# Altium footprint library 排母.PcbLib: 66 footprints (part 2 of 5)
Each footprint in its own frame and in the unit in brackets; x right, y up, seen from the top. Pads: shape width x height; smd on the part's side, far side on the other; paste and mask are expansions set on the pad; w line width, h text height; cw(c..) or ccw(c..) is an arc to the next point about the centre after c.
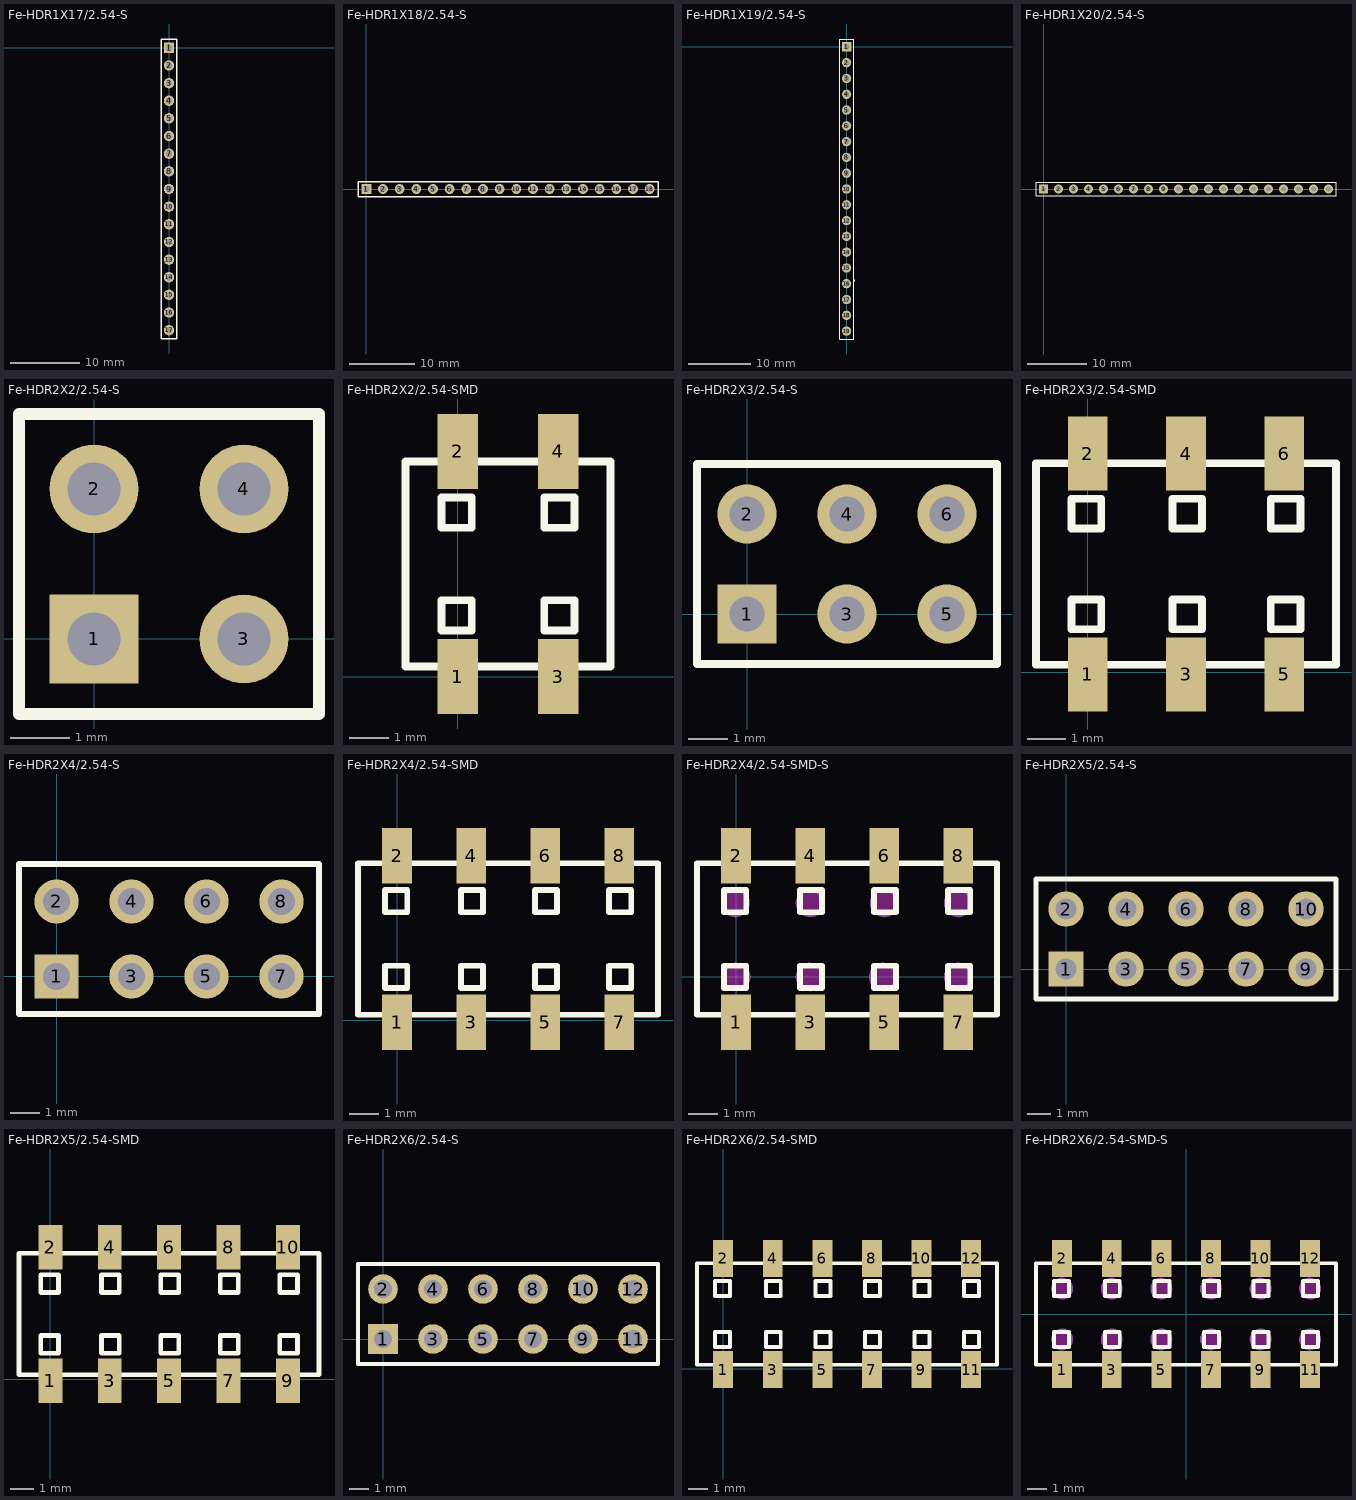
[diagram p1: the footprints below, top view; thin cyan lines are the x and y axes]

## Fe-HDR1X17/2.54-S [mm]
pads (17):
  rect 1.5x1.5 hole 0.9: 1(0,0)
  round 1.5 hole 0.9: 2(0,-2.54) 3(0,-5.08) 4(0,-7.62) 5(0,-10.16) 6(0,-12.7) 7(0,-15.24) 8(0,-17.78) 9(0,-20.32) 10(0,-22.86) 11(0,-25.4) 12(0,-27.94) 13(0,-30.48) 14(0,-33.02) 15(0,-35.56) 16(0,-38.1) 17(0,-40.64)
Top Overlay:
  lines w0.2: -1.143,-41.91 1.143,-41.91 1.143,-0.508 1.143,1.27 -1.143,1.27 -1.143,-41.91
3D body "Female-Header-2.54-Single-17.stp": height 3.2, standoff -8.5, extent -1.25,-42.035 1.25,1.395

## Fe-HDR1X18/2.54-S [mm]
pads (18):
  rect 1.5x1.5 hole 0.9: 1(0,0)
  round 1.5 hole 0.9: 2(2.54,0) 3(5.08,0) 4(7.62,0) 5(10.16,0) 6(12.7,0) 7(15.24,0) 8(17.78,0) 9(20.32,0) 10(22.86,0) 11(25.4,0) 12(27.94,0) 13(30.48,0) 14(33.02,0) 15(35.56,0) 16(38.1,0) 17(40.64,0) 18(43.18,0)
Top Overlay:
  lines w0.2: -1.27,-1.143 44.45,-1.143 44.45,1.143 0.762,1.143 -1.27,1.143 -1.27,-1.143
3D body "Female-Header-2.54-Single-18.stp": height 3.2, standoff -8.5, extent -1.393,-1.25 44.577,1.25

## Fe-HDR1X19/2.54-S [mm]
pads (19):
  rect 1.5x1.5 hole 0.9: 1(0,0)
  round 1.5 hole 0.9: 2(0,-2.54) 3(0,-5.08) 4(0,-7.62) 5(0,-10.16) 6(0,-12.7) 7(0,-15.24) 8(0,-17.78) 9(0,-20.32) 10(0,-22.86) 11(0,-25.4) 12(0,-27.94) 13(0,-30.48) 14(0,-33.02) 15(0,-35.56) 16(0,-38.1) 17(0,-40.64) 18(0,-43.18) 19(0,-45.72)
Top Overlay:
  lines w0.2: 1.27,-37.677 1.27,-37.465 ; -1.143,-46.99 -1.143,1.27 1.143,1.27 1.143,-0.508 1.143,-46.99 -1.143,-46.99
3D body "Female-Header-2.54-Single-19.stp": height 3.2, standoff -8.5, extent -1.25,-47.113 1.25,1.397

## Fe-HDR1X20/2.54-S [mm]
pads (20):
  rect 1.5x1.5 hole 0.9: 1(0,0)
  round 1.5 hole 0.9: 2(2.54,0) 3(5.08,0) 4(7.62,0) 5(10.16,0) 6(12.7,0) 7(15.24,0) 8(17.78,0) 9(20.32,0) 10(22.86,0) 11(25.4,0) 12(27.94,0) 13(30.48,0) 14(33.02,0) 15(35.56,0) 16(38.1,0) 17(40.64,0) 18(43.18,0) 19(45.72,0) 20(48.26,0)
Top Overlay:
  lines w0.2: -1.27,-1.143 -1.27,1.143 0.508,1.143 49.53,1.143 49.53,-1.143 -1.27,-1.143
3D body "Female-Header-2.54-Single-20.stp": height 2.74, standoff -8.96, extent -1.397,-1.27 49.653,1.23

## Fe-HDR2X2/2.54-S [mm] "Connector; Header; 2x2 Position"
pads (4):
  rect 1.5x1.5 hole 0.9: 1(0,0)
  round 1.5 hole 0.9: 2(0,2.54) 3(2.54,0) 4(2.54,2.54)
Top Overlay:
  lines w0.2: -1.27,-1.27 3.81,-1.27 3.81,3.81 -1.27,3.81 -1.27,-1.27
3D body "Female-Header-2.54-Double-4.stp": height 8.5, standoff -3.2, extent -1.395,-1.23 3.935,3.77

## Fe-HDR2X2/2.54-SMD [mm]
pads (4):
  rect 1.02x1.9 smd: 1(0,0) 2(0,5.7) 3(2.54,0) 4(2.54,5.7)
Top Overlay:
  lines w0.2: -1.33,0.25 -1.33,5.45 3.87,5.45 3.87,0.25 -1.33,0.25 ; -0.411,1.169 -0.411,1.931 0.351,1.931 0.351,1.169 -0.411,1.169 ; -0.411,3.769 -0.411,4.531 0.351,4.531 0.351,3.769 -0.411,3.769 ; 2.189,1.169 2.189,1.931 2.951,1.931 2.951,1.169 2.189,1.169 ; 2.189,3.769 2.189,4.531 2.951,4.531 2.951,3.769 2.189,3.769
3D body "Fe-Header2X2.STEP": height 5.14, standoff -0.01, extent -1.3,-0.304 3.84,6.096

## Fe-HDR2X3/2.54-S [mm] "Connector; Header; 3x2 Position"
pads (6):
  rect 1.5x1.5 hole 0.9: 1(0,0)
  round 1.5 hole 0.9: 2(0,2.54) 3(2.54,0) 4(2.54,2.54) 5(5.08,0) 6(5.08,2.54)
Top Overlay:
  lines w0.2: 1.482,-1.27 6.35,-1.27 ; 6.35,-1.27 6.35,3.81 -1.27,3.81 -1.27,-1.27 6.35,-1.27
3D body "Female-Header-2.54-Double-6.stp": height 8.5, standoff -3.2, extent -1.397,-1.19 6.473,3.81

## Fe-HDR2X3/2.54-SMD [mm]
pads (6):
  rect 1.02x1.9 smd: 1(0,-0.056) 2(0,5.644) 3(2.54,-0.056) 4(2.54,5.644) 5(5.08,-0.056) 6(5.08,5.644)
Top Overlay:
  lines w0.2: -1.33,0.194 -1.33,5.394 6.41,5.394 6.41,0.194 -1.33,0.194 ; -0.411,1.113 -0.411,1.875 0.351,1.875 0.351,1.113 -0.411,1.113 ; -0.411,3.713 -0.411,4.475 0.351,4.475 0.351,3.713 -0.411,3.713 ; 2.189,1.113 2.189,1.875 2.951,1.875 2.951,1.113 2.189,1.113 ; 2.189,3.713 2.189,4.475 2.951,4.475 2.951,3.713 2.189,3.713 ; 4.729,1.113 5.491,1.113 5.491,1.875 4.729,1.875 4.729,1.113 ; 4.729,3.713 5.491,3.713 5.491,4.475 4.729,4.475 4.729,3.713
3D body "Fe-Header2X1.STEP": height 5.15, standoff 0, extent -1.33,-0.304 1.27,6.096
3D body "Fe-Header2X1.STEP": height 5.15, standoff 0, extent 1.21,-0.304 3.81,6.096
3D body "Fe-Header2X1.STEP": height 5.15, standoff 0, extent 3.75,-0.304 6.35,6.096

## Fe-HDR2X4/2.54-S [mm] "Connector; Header; 4x2 Position"
pads (8):
  rect 1.5x1.5 hole 0.9: 1(0,0)
  round 1.5 hole 0.9: 2(0,2.54) 3(2.54,0) 4(2.54,2.54) 5(5.08,0) 6(5.08,2.54) 7(7.62,0) 8(7.62,2.54)
Top Overlay:
  lines w0.2: -1.27,-1.27 8.89,-1.27 8.89,3.81 -1.27,3.81 -1.27,-1.27
3D body "Female-Header-2.54-Double-8.stp": height 8.5, standoff -3.2, extent -1.266,-1.23 9.144,3.77

## Fe-HDR2X4/2.54-SMD [mm]
pads (8):
  rect 1.02x1.9 smd: 1(0,-0.056) 2(0,5.644) 3(2.54,-0.056) 4(2.54,5.644) 5(5.08,-0.056) 6(5.08,5.644) 7(7.62,-0.056) 8(7.62,5.644)
Top Overlay:
  lines w0.2: -1.34,0.194 -1.34,5.394 8.95,5.394 8.95,0.194 -1.34,0.194 ; -0.411,1.113 0.351,1.113 0.351,1.875 -0.411,1.875 -0.411,1.113 ; -0.411,3.713 0.351,3.713 0.351,4.475 -0.411,4.475 -0.411,3.713 ; 2.189,1.113 2.951,1.113 2.951,1.875 2.189,1.875 2.189,1.113 ; 2.189,3.713 2.951,3.713 2.951,4.475 2.189,4.475 2.189,3.713 ; 4.729,1.113 4.729,1.875 5.491,1.875 5.491,1.113 4.729,1.113 ; 4.729,3.713 4.729,4.475 5.491,4.475 5.491,3.713 4.729,3.713 ; 7.269,1.113 8.031,1.113 8.031,1.875 7.269,1.875 7.269,1.113 ; 7.269,3.713 8.031,3.713 8.031,4.475 7.269,4.475 7.269,3.713
3D body "Fe-Header2X1.STEP": height 5.15, standoff 0, extent 6.29,-0.304 8.89,6.096
3D body "Fe-Header2X1.STEP": height 5.15, standoff 0, extent -1.33,-0.304 1.27,6.096
3D body "Fe-Header2X1.STEP": height 5.15, standoff 0, extent 1.21,-0.304 3.81,6.096
3D body "Fe-Header2X1.STEP": height 5.15, standoff 0, extent 3.75,-0.304 6.35,6.096

## Fe-HDR2X4/2.54-SMD-S [mm]
pads (8):
  rect 1.02x1.9 smd: 1(0,-1.55) 2(0,4.15) 3(2.54,-1.55) 4(2.54,4.15) 5(5.08,-1.55) 6(5.08,4.15) 7(7.62,-1.55) 8(7.62,4.15)
Top Overlay:
  lines w0.2: -1.34,-1.3 8.95,-1.3 8.95,3.9 -1.34,3.9 -1.34,-1.3 ; -0.411,-0.381 -0.411,0.381 0.351,0.381 0.351,-0.381 -0.411,-0.381 ; -0.411,2.219 -0.411,2.981 0.351,2.981 0.351,2.219 -0.411,2.219 ; 2.189,-0.381 2.189,0.381 2.951,0.381 2.951,-0.381 2.189,-0.381 ; 2.189,2.219 2.189,2.981 2.951,2.981 2.951,2.219 2.189,2.219 ; 4.729,-0.381 5.491,-0.381 5.491,0.381 4.729,0.381 4.729,-0.381 ; 4.729,2.219 5.491,2.219 5.491,2.981 4.729,2.981 4.729,2.219 ; 7.269,-0.381 7.269,0.381 8.031,0.381 8.031,-0.381 7.269,-0.381 ; 7.269,2.219 7.269,2.981 8.031,2.981 8.031,2.219 7.269,2.219
Keep-Out Layer:
  drawing of 8 lines, arcs and shapes, not listed
Mechanical 1:
  circle w0.1: c0,0 r0.445
  circle w0.1: c2.54,0 r0.445
  circle w0.1: c5.05,0 r0.445
  circle w0.1: c7.62,0 r0.445
  circle w0.1: c7.62,2.54 r0.445
  circle w0.1: c5.08,2.54 r0.445
  circle w0.1: c2.54,2.54 r0.445
  circle w0.1: c-0.03,2.54 r0.445
3D body "Fe-Header2X1.STEP": height 5.15, standoff 0, extent 3.75,-1.798 6.35,4.602
3D body "Fe-Header2X1.STEP": height 5.15, standoff 0, extent 1.21,-1.798 3.81,4.602
3D body "Fe-Header2X1.STEP": height 5.15, standoff 0, extent -1.33,-1.798 1.27,4.602
3D body "Fe-Header2X1.STEP": height 5.15, standoff 0, extent 6.29,-1.798 8.89,4.602

## Fe-HDR2X5/2.54-S [mm] "Connector; Header; 5x2 Position"
pads (10):
  rect 1.5x1.5 hole 0.9: 1(0,0)
  round 1.5 hole 0.9: 2(0,2.54) 3(2.54,0) 4(2.54,2.54) 5(5.08,0) 6(5.08,2.54) 7(7.62,0) 8(7.62,2.54) 9(10.16,0) 10(10.16,2.54)
Top Overlay:
  lines w0.2: -1.27,-1.27 -1.27,3.81 11.43,3.81 11.43,-1.27 -1.27,-1.27
3D body "Female-Header-2.54-Double-10.stp": height 8.5, standoff -3.2, extent -1.395,-1.23 11.555,3.77

## Fe-HDR2X5/2.54-SMD [mm]
pads (10):
  rect 1.02x1.9 smd: 1(0,-0.056) 2(0,5.644) 3(2.54,-0.056) 4(2.54,5.644) 5(5.08,-0.056) 6(5.08,5.644) 7(7.62,-0.056) 8(7.62,5.644) 9(10.16,-0.056) 10(10.16,5.644)
Top Overlay:
  lines w0.2: -1.34,0.194 11.49,0.194 11.49,5.394 -1.34,5.394 -1.34,0.194 ; -0.411,1.113 -0.411,1.875 0.351,1.875 0.351,1.113 -0.411,1.113 ; -0.411,3.713 -0.411,4.475 0.351,4.475 0.351,3.713 -0.411,3.713 ; 2.189,1.113 2.189,1.875 2.951,1.875 2.951,1.113 2.189,1.113 ; 2.189,3.713 2.189,4.475 2.951,4.475 2.951,3.713 2.189,3.713 ; 4.729,1.113 5.491,1.113 5.491,1.875 4.729,1.875 4.729,1.113 ; 4.729,3.713 5.491,3.713 5.491,4.475 4.729,4.475 4.729,3.713 ; 7.269,1.113 7.269,1.875 8.031,1.875 8.031,1.113 7.269,1.113 ; 7.269,3.713 7.269,4.475 8.031,4.475 8.031,3.713 7.269,3.713 ; 9.809,1.113 9.809,1.875 10.571,1.875 10.571,1.113 9.809,1.113 ; 9.809,3.713 9.809,4.475 10.571,4.475 10.571,3.713 9.809,3.713
3D body "Fe-Header2X1.STEP": height 5.15, standoff 0, extent 3.75,-0.304 6.35,6.096
3D body "Fe-Header2X1.STEP": height 5.15, standoff 0, extent 1.21,-0.304 3.81,6.096
3D body "Fe-Header2X1.STEP": height 5.15, standoff 0, extent -1.33,-0.304 1.27,6.096
3D body "Fe-Header2X1.STEP": height 5.15, standoff 0, extent 8.83,-0.304 11.43,6.096
3D body "Fe-Header2X1.STEP": height 5.15, standoff 0, extent 6.29,-0.304 8.89,6.096

## Fe-HDR2X6/2.54-S [mm] "Connector; Header; 6x2 Position"
pads (12):
  rect 1.5x1.5 hole 0.9: 1(0,0)
  round 1.5 hole 0.9: 2(0,2.54) 3(2.54,0) 4(2.54,2.54) 5(5.08,0) 6(5.08,2.54) 7(7.62,0) 8(7.62,2.54) 9(10.16,0) 10(10.16,2.54) 11(12.7,0) 12(12.7,2.54)
Top Overlay:
  lines w0.2: -1.27,-1.27 13.97,-1.27 13.97,3.81 -1.27,3.81 -1.27,-1.27
3D body "Female-Header-2.54-Double-12.stp": height 8.5, standoff -3.2, extent -1.395,-1.23 14.095,3.77

## Fe-HDR2X6/2.54-SMD [mm]
pads (12):
  rect 1.02x1.9 smd: 1(0,-0.056) 2(0,5.644) 3(2.54,-0.056) 4(2.54,5.644) 5(5.08,-0.056) 6(5.08,5.644) 7(7.62,-0.056) 8(7.62,5.644) 9(10.16,-0.056) 10(10.16,5.644) 11(12.7,-0.056) 12(12.7,5.644)
Top Overlay:
  lines w0.2: -1.34,0.194 -1.34,5.394 14.03,5.394 14.03,0.194 -1.34,0.194 ; -0.411,1.113 -0.411,1.875 0.351,1.875 0.351,1.113 -0.411,1.113 ; -0.411,3.713 -0.411,4.475 0.351,4.475 0.351,3.713 -0.411,3.713 ; 2.189,1.113 2.189,1.875 2.951,1.875 2.951,1.113 2.189,1.113 ; 2.189,3.713 2.189,4.475 2.951,4.475 2.951,3.713 2.189,3.713 ; 4.729,1.113 5.491,1.113 5.491,1.875 4.729,1.875 4.729,1.113 ; 4.729,3.713 5.491,3.713 5.491,4.475 4.729,4.475 4.729,3.713 ; 7.269,1.113 7.269,1.875 8.031,1.875 8.031,1.113 7.269,1.113 ; 7.269,3.713 7.269,4.475 8.031,4.475 8.031,3.713 7.269,3.713 ; 9.809,1.113 9.809,1.875 10.571,1.875 10.571,1.113 9.809,1.113 ; 9.809,3.713 9.809,4.475 10.571,4.475 10.571,3.713 9.809,3.713 ; 12.349,1.113 12.349,1.875 13.111,1.875 13.111,1.113 12.349,1.113 ; 12.349,3.713 12.349,4.475 13.111,4.475 13.111,3.713 12.349,3.713
3D body "Fe-Header2X1.STEP": height 5.15, standoff 0, extent 11.37,-0.304 13.97,6.096
3D body "Fe-Header2X1.STEP": height 5.15, standoff 0, extent 6.29,-0.304 8.89,6.096
3D body "Fe-Header2X1.STEP": height 5.15, standoff 0, extent 8.83,-0.304 11.43,6.096
3D body "Fe-Header2X1.STEP": height 5.15, standoff 0, extent -1.33,-0.304 1.27,6.096
3D body "Fe-Header2X1.STEP": height 5.15, standoff 0, extent 1.21,-0.304 3.81,6.096
3D body "Fe-Header2X1.STEP": height 5.15, standoff 0, extent 3.75,-0.304 6.35,6.096

## Fe-HDR2X6/2.54-SMD-S [mm] "增加通孔"
pads (12):
  rect 1.02x1.9 smd: 1(-6.35,-2.85) 2(-6.35,2.85) 3(-3.81,-2.85) 4(-3.81,2.85) 5(-1.27,-2.85) 6(-1.27,2.85) 7(1.27,-2.85) 8(1.27,2.85) 9(3.81,-2.85) 10(3.81,2.85) 11(6.35,-2.85) 12(6.35,2.85)
Top Overlay:
  lines w0.2: -7.69,-2.6 -7.69,2.6 7.68,2.6 7.68,-2.6 -7.69,-2.6 ; -6.761,-1.681 -6.761,-0.919 -5.999,-0.919 -5.999,-1.681 -6.761,-1.681 ; -6.761,0.919 -6.761,1.681 -5.999,1.681 -5.999,0.919 -6.761,0.919 ; -4.161,-1.681 -4.161,-0.919 -3.399,-0.919 -3.399,-1.681 -4.161,-1.681 ; -4.161,0.919 -4.161,1.681 -3.399,1.681 -3.399,0.919 -4.161,0.919 ; -1.621,-1.681 -0.859,-1.681 -0.859,-0.919 -1.621,-0.919 -1.621,-1.681 ; -1.621,0.919 -0.859,0.919 -0.859,1.681 -1.621,1.681 -1.621,0.919 ; 0.919,-1.681 0.919,-0.919 1.681,-0.919 1.681,-1.681 0.919,-1.681 ; 0.919,0.919 0.919,1.681 1.681,1.681 1.681,0.919 0.919,0.919 ; 3.459,-1.681 3.459,-0.919 4.221,-0.919 4.221,-1.681 3.459,-1.681 ; 3.459,0.919 3.459,1.681 4.221,1.681 4.221,0.919 3.459,0.919 ; 5.999,-1.681 5.999,-0.919 6.761,-0.919 6.761,-1.681 5.999,-1.681 ; 5.999,0.919 5.999,1.681 6.761,1.681 6.761,0.919 5.999,0.919
Keep-Out Layer:
  drawing of 13 lines, arcs and shapes, not listed
Mechanical 1:
  circle w0.127: c-6.35,1.3 r0.5
  circle w0.127: c-6.35,-1.3 r0.5
  circle w0.127: c-3.81,-1.3 r0.5
  circle w0.127: c-1.27,-1.3 r0.5
  circle w0.127: c1.27,-1.3 r0.5
  circle w0.127: c3.81,-1.3 r0.5
  circle w0.127: c6.35,-1.3 r0.5
  circle w0.127: c-3.81,1.3 r0.5
  circle w0.127: c-1.27,1.3 r0.5
  circle w0.127: c1.27,1.3 r0.5
  circle w0.127: c3.81,1.3 r0.5
  circle w0.127: c6.35,1.3 r0.5
3D body "Fe-Header2X1.STEP": height 5.15, standoff 0, extent 5.02,-3.098 7.62,3.302
3D body "Fe-Header2X1.STEP": height 5.15, standoff 0, extent -0.06,-3.098 2.54,3.302
3D body "Fe-Header2X1.STEP": height 5.15, standoff 0, extent 2.48,-3.098 5.08,3.302
3D body "Fe-Header2X1.STEP": height 5.15, standoff 0, extent -7.68,-3.098 -5.08,3.302
3D body "Fe-Header2X1.STEP": height 5.15, standoff 0, extent -5.14,-3.098 -2.54,3.302
3D body "Fe-Header2X1.STEP": height 5.15, standoff 0, extent -2.6,-3.098 0,3.302